# Altium footprint library Components.PcbLib: 82 footprints (part 1 of 6)
Each footprint in its own frame and in the unit in brackets; x right, y up, seen from the top. Pads: shape width x height; smd on the part's side, far side on the other; paste and mask are expansions set on the pad; w line width, h text height; cw(c..) or ccw(c..) is an arc to the next point about the centre after c.
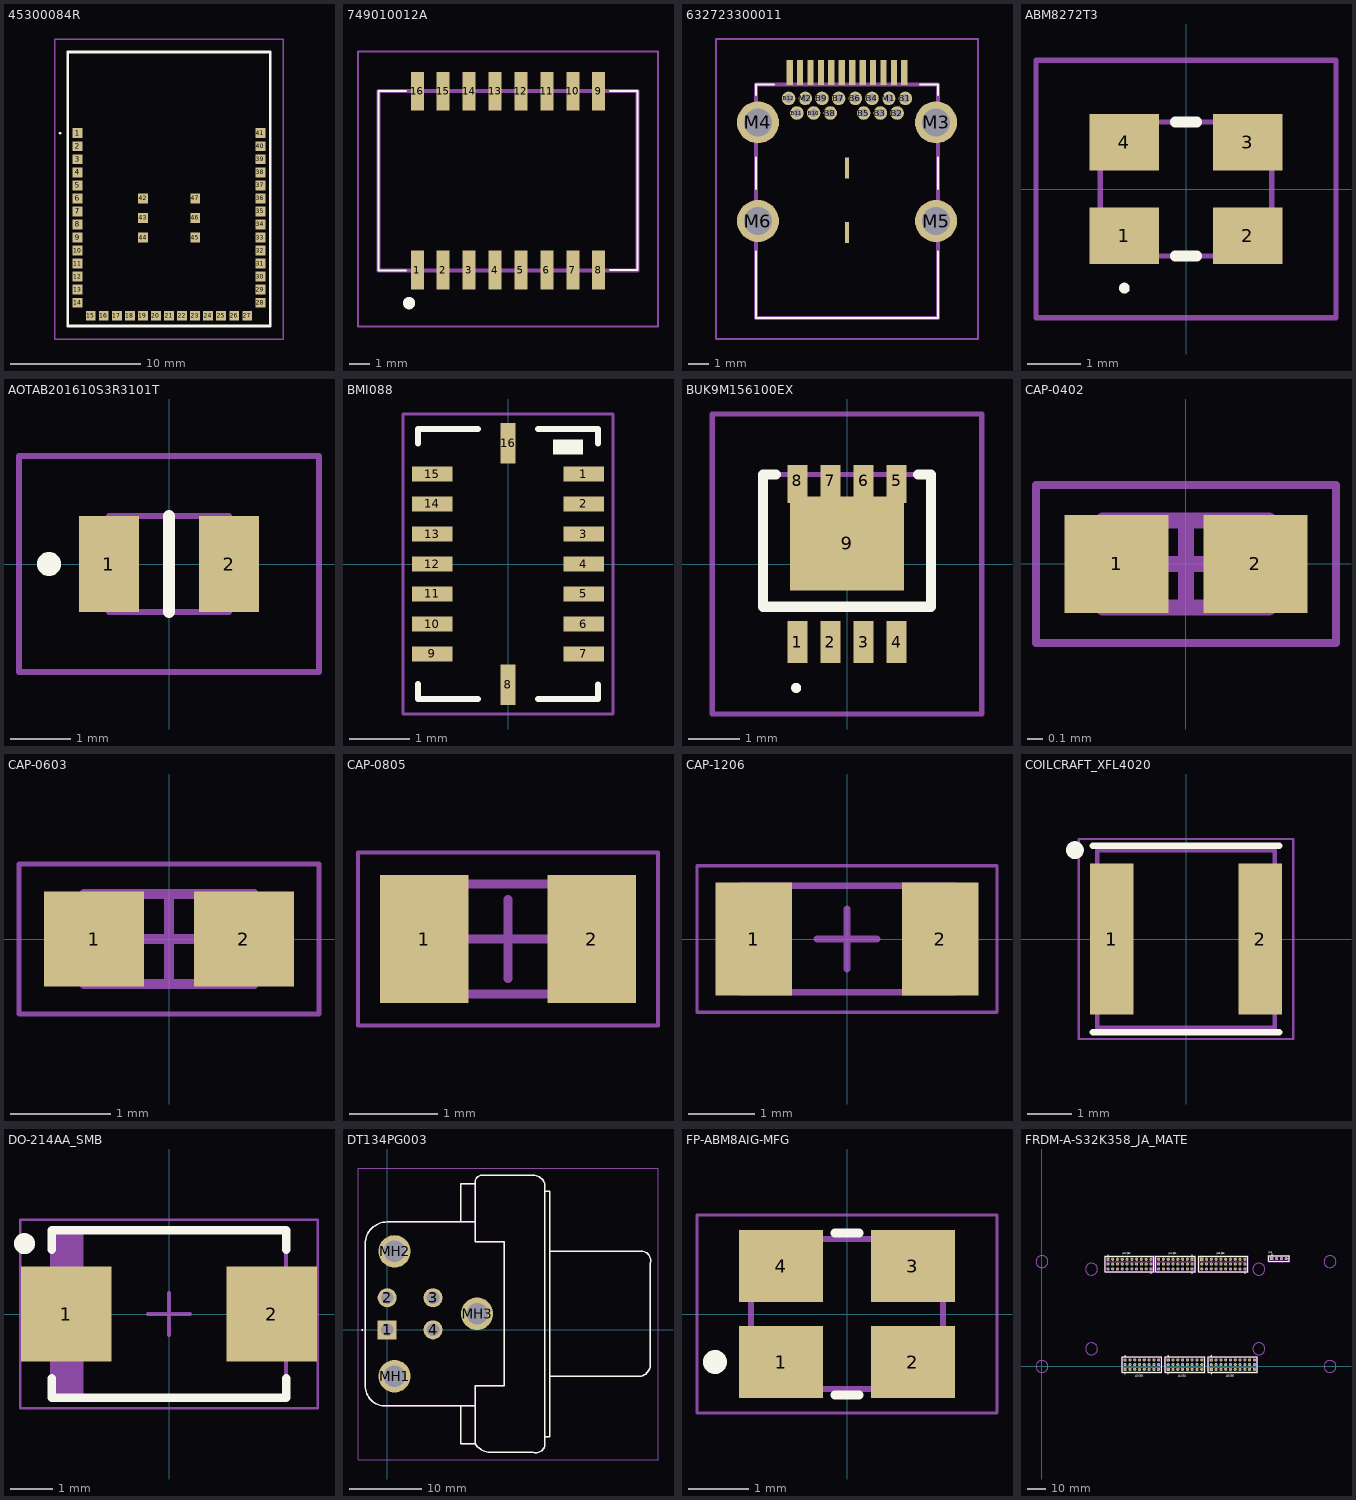
[diagram p0: the footprints below, top view; thin cyan lines are the x and y axes]

## 45300084R [mm]
pads (47):
  rect 0.76x0.76 smd: 1(2533,2544.28) 2(2533,2543.28) 3(2533,2542.28) 4(2533,2541.28) 5(2533,2540.28) 6(2533,2539.28) 7(2533,2538.28) 8(2533,2537.28) 9(2533,2536.28) 10(2533,2535.28) 11(2533,2534.28) 12(2533,2533.28) 13(2533,2532.28) 14(2533,2531.28) 15(2534,2530.28) 16(2535,2530.28) 17(2536,2530.28) 18(2537,2530.28) 19(2538,2530.28) 20(2539,2530.28) 21(2540,2530.28) 22(2541,2530.28) 23(2542,2530.28) 24(2543,2530.28) 25(2544,2530.28) 26(2545,2530.28) 27(2546,2530.28) 28(2547,2531.28) 29(2547,2532.28) 30(2547,2533.28) 31(2547,2534.28) 32(2547,2535.28) 33(2547,2536.28) 34(2547,2537.28) 35(2547,2538.28) 36(2547,2539.28) 37(2547,2540.28) 38(2547,2541.28) 39(2547,2542.28) 40(2547,2543.28) 41(2547,2544.28) 42(2538.01,2539.28) 43(2538.01,2537.78) 44(2538.01,2536.28) 45(2542.01,2536.28) 46(2542.01,2537.78) 47(2542.01,2539.28)
Top Overlay:
  lines w0.1: 2531.6,2544.28 ccw(c2531.65,2544.28) 2531.7,2544.28 ; 2531.6,2544.28 cw(c2531.65,2544.28) 2531.7,2544.28 ; 2531.6,2544.28 ccw(c2531.65,2544.28) 2531.7,2544.28
  lines w0.2: 2532.25,2529.5 2532.25,2550.5 2547.75,2550.5 2547.75,2529.5 2532.25,2529.5
Mechanical 13:
  lines w0.1: 2532.25,2529.5 2532.25,2550.5 2547.75,2550.5 2547.75,2529.5 2532.25,2529.5
Mechanical 15:
  lines w0.1: 2531.25,2528.5 2531.25,2551.5 2548.75,2551.5 2548.75,2528.5 2531.25,2528.5
3D body "453-00084R.stp": height 2.55, standoff 0, extent 2532.25,2529.5 2547.75,2550.5

## 749010012A [mm]
pads (16):
  rect 0.64x1.91 smd: 1(1265.555,1265.615) 2(1266.825,1265.615) 3(1268.095,1265.615) 4(1269.365,1265.615) 5(1270.635,1265.615) 6(1271.905,1265.615) 7(1273.175,1265.615) 8(1274.445,1265.615) 9(1274.445,1274.385) 10(1273.175,1274.385) 11(1271.905,1274.385) 12(1270.635,1274.385) 13(1269.365,1274.385) 14(1268.095,1274.385) 15(1266.825,1274.385) 16(1265.555,1274.385)
Top Overlay:
  lines w0.1: 1265,1265.6 1263.65,1265.6 1263.65,1274.385 1265,1274.4 ; 1275,1265.615 1276.35,1265.615 1276.35,1274.385 1275,1274.4
  lines w0.3: 1265,1264 cw(c1265.15,1264) 1265.3,1264 cw(c1265.15,1264) 1265,1264
Mechanical 13:
  lines w0.2: 1263.65,1265.6 1263.65,1274.4 1276.35,1274.4 1276.35,1265.6 1263.65,1265.6
Mechanical 15:
  lines w0.1: 1262.65,1262.85 1262.65,1276.34 1277.35,1276.34 1277.35,1262.85 1262.65,1262.85
3D body "749010012A.stp": height 5.4, standoff 0, extent 1263.9,1265.24 1276.1,1274.76

## 632723300011 [mm]
pads (32):
  rect 0.3x1.2 smd: A1(1267.25,1275.895) A2(1267.75,1275.895) A3(1268.25,1275.895) A4(1268.75,1275.895) A5(1269.25,1275.895) A6(1269.75,1275.895) A7(1270.25,1275.895) A8(1270.75,1275.895) A9(1271.25,1275.895) A10(1271.75,1275.895) A11(1272.25,1275.895) A12(1272.75,1275.895)
  round 0.65 hole 0.4: B1(1272.8,1274.645) B2(1272.4,1273.945) B3(1271.6,1273.945) B4(1271.2,1274.645) B5(1270.8,1273.945) B6(1270.4,1274.645) B7(1269.6,1274.645) B8(1269.2,1273.945) B9(1268.8,1274.645) B10(1268.4,1273.945) B11(1267.6,1273.945) B12(1267.2,1274.645) M1(1272,1274.645) M2(1268,1274.645)
  round 2.012 hole 1.342: M3(1274.27,1273.495) M4(1265.73,1273.495) M5(1274.27,1268.765) M6(1265.73,1268.765)
  rect 0.2x1 smd: M7(1270,1271.315) M8(1270,1268.215)
Top Overlay:
  lines w0.1: 1265.63,1267.305 1265.63,1264.105 1274.37,1264.105 1274.37,1267.305 ; 1265.63,1270.305 1265.63,1271.805 ; 1265.63,1274.805 1265.63,1275.305 1266.5,1275.305 ; 1273.5,1275.305 1274.37,1275.305 1274.37,1274.805 ; 1274.37,1270.305 1274.37,1271.805
Mechanical 13:
  lines w0.2: 1265.63,1264.105 1274.37,1264.105 1274.37,1275.305 1265.63,1275.305 1265.63,1264.105
Mechanical 15:
  lines w0.1: 1263.724,1263.105 1276.276,1263.105 1276.276,1277.495 1263.724,1277.495 1263.724,1263.105
3D body "632723300011.stp": height 3, standoff -1.86, extent 1265.63,1264.413 1274.37,1276.207

## ABM8272T3 [mm]
pads (4):
  rect 1.3x1.05 smd: 1(-1.15,-0.875) 2(1.15,-0.875) 3(1.15,0.875) 4(-1.15,0.875)
Top Overlay:
  lines w0.1: -1.15,-1.9 cw(c-1.15,-1.85) -1.15,-1.8 cw(c-1.15,-1.85) -1.15,-1.9
  lines w0.2: -0.2,-1.25 0.2,-1.25 ; -0.2,1.25 0.2,1.25
Mechanical 13:
  lines w0.1: -1.6,-1.25 -1.6,1.25 1.6,1.25 1.6,-1.25 -1.6,-1.25
Mechanical 15:
  lines w0.1: -2.8,-2.4 -2.8,2.4 2.8,2.4 2.8,-2.4 -2.8,-2.4
3D body "ABM8-272-T3.stp": height 0.75, standoff 0, extent -1.6,-1.25 1.6,1.25

## AOTAB201610S3R3101T [mm]
pads (2):
  rect 1x1.6 smd: 1(-1,0) 2(1,0)
Top Overlay:
  lines w0.2: 0,-0.8 0,0.8 ; -2,-0.1 ccw(c-2,0) -2,0.1 ccw(c-2,0) -2,-0.1
Mechanical 13:
  lines w0.1: -1,-0.8 -1,0.8 1,0.8 1,-0.8 -1,-0.8
Mechanical 15:
  lines w0.1: -2.5,-1.8 -2.5,1.8 2.5,1.8 2.5,-1.8 -2.5,-1.8
3D body "AOTA-B201610S3R3-101-T.stp": height 1, standoff 0, extent -1,-0.8 1,0.8

## BMI088 [mm]
pads (16):
  rect 0.675x0.25 smd: 1(1.266,1.5) 2(1.266,1) 3(1.266,0.5) 4(1.266,0) 5(1.266,-0.5) 6(1.266,-1) 7(1.266,-1.5) 9(-1.266,-1.5) 10(-1.266,-1) 11(-1.266,-0.5) 12(-1.266,0) 13(-1.266,0.5) 14(-1.266,1) 15(-1.266,1.5)
  rect 0.25x0.675 smd: 8(0,-2.012) 16(0,2.012)
Top Overlay:
  rectangle: 0.75,1.825 1.25,2.075
  lines w0.1: -1.5,-2 -1.5,-2.25 -0.5,-2.25 ; -1.5,2.012 -1.5,2.25 -0.5,2.25 ; 0.5,-2.25 1.5,-2.25 1.5,-2.012 ; 1.262,2.25 0.5,2.25 1.5,2.25 1.5,2.012
Mechanical 15:
  lines w0.05: -1.75,-2.5 1.75,-2.5 1.75,2.5 -1.75,2.5 -1.75,-2.5
3D body: height 1, standoff 0, extent -1.5,-2.25 1.5,2.25

## BUK9M156100EX [mm]
pads (11):
  rect 0.4x0.83 smd: 1(-0.975,-1.534) 2(-0.325,-1.534) 3(0.325,-1.534) 4(0.975,-1.534)
  rect 0.4x0.62 smd: 5(0.975,1.64) 6(0.325,1.64) 7(-0.325,1.64) 8(-0.975,1.64)
  rect 2.25x1.85 smd: 9(0,0.405)
  rect 0.05x0.13 smd: 10(1.15,1.265) 11(-1.15,1.265)
Top Overlay:
  lines w0.1: -1,-2.488 cw(c-1,-2.438) -1,-2.388 cw(c-1,-2.438) -1,-2.488
  lines w0.2: -1.4,1.759 -1.65,1.759 -1.65,-0.841 1.65,-0.841 1.65,1.759 1.4,1.759
Mechanical 13:
  lines w0.1: -1.65,-0.841 -1.65,1.759 1.65,1.759 1.65,-0.841 -1.65,-0.841
Mechanical 15:
  lines w0.1: -2.65,-2.95 -2.65,2.95 2.65,2.95 2.65,-2.95 -2.65,-2.95
3D body "BUK9M43-100EX.stp": height 0.85, standoff 0, extent -1.647,-1.652 1.653,1.648

## CAP-0402 [mm] "Chip Capacitor, 2-Leads, Body 1.00x0.50mm, IPC Medium Density"
height 0.55
pads (2):
  rect 0.66x0.62 smd: 1(-0.44,0) 2(0.44,0)
Mechanical 13:
  lines w0.1: -0.525,-0.275 0.525,-0.275 0.525,0.275 -0.525,0.275 -0.525,-0.275
Mechanical 15:
  lines w0.05: -0.95,-0.5 0.95,-0.5 0.95,0.5 -0.95,0.5 -0.95,-0.5
  lines w0.1: -0.275,0 0.275,0 ; 0,-0.275 0,0.275
3D body "CAPC1005X06N.step": height 0.55, standoff 0, extent -0.525,-0.275 0.525,0.275

## CAP-0603 [mm] "Chip Capacitor, 2-Leads, Body 1.60x0.80mm, IPC Medium Density"
height 0.9
pads (2):
  rect 1x0.95 smd: 1(-0.75,0) 2(0.75,0)
Mechanical 13:
  lines w0.1: -0.85,-0.45 -0.85,0.45 0.85,0.45 0.85,-0.45 -0.85,-0.45
Mechanical 15:
  lines w0.05: -1.5,-0.75 -1.5,0.75 1.5,0.75 1.5,-0.75 -1.5,-0.75
  lines w0.1: -0.45,0 0.45,0 ; 0,-0.45 0,0.45
3D body "CAPC1608X09N.step": height 0.9, standoff 0, extent -0.85,-0.45 0.85,0.45

## CAP-0805 [mm] "Chip Capacitor, 2-Leads, Body 2.00x1.25mm, IPC nominal land (1.00x1.45 pads, 1.90 pitch)"
pads (2):
  rect 1x1.45 smd: 1(1269.05,1270) 2(1270.95,1270)
Mechanical 13:
  lines w0.1: 1269,1269.375 1269,1270.625 1271,1270.625 1271,1269.375 1269,1269.375
Mechanical 15:
  lines w0.05: 1268.3,1269.02 1268.3,1270.98 1271.7,1270.98 1271.7,1269.02 1268.3,1269.02
  lines w0.1: 1269.55,1270 1270.45,1270 ; 1270,1269.55 1270,1270.45

## CAP-1206 [mm] "Chip Capacitor, 2-Leads, Body 3.20x1.60mm, land matches Passives RES-1206 (1.15x1.70 pads, 2.80 pitch)"
pads (2):
  rect 1.15x1.7 smd: 1(-1.4,0) 2(1.4,0)
Mechanical 13:
  lines w0.1: -1.6,-0.8 1.6,-0.8 1.6,0.8 -1.6,0.8 -1.6,-0.8
Mechanical 15:
  lines w0.05: -2.25,-1.1 2.25,-1.1 2.25,1.1 -2.25,1.1 -2.25,-1.1
  lines w0.1: -0.45,0 0.45,0 ; 0,-0.45 0,0.45

## COILCRAFT_XFL4020 [mm] "Coilcraft XFL4020 4x4 mm, recommended land pattern; 1 = start (short) lead"
pads (2):
  rect 0.98x3.4 smd: 1(-1.675,0) 2(1.675,0)
Top Overlay:
  circle w0.2: c-2.5,2 r0.1
  lines w0.15: -2.1,-2.1 2.1,-2.1 ; -2.1,2.1 2.1,2.1
Mechanical 13:
  lines w0.1: -2,-2 2,-2 2,2 -2,2 -2,-2
Mechanical 15:
  lines w0.05: -2.415,-2.25 2.415,-2.25 2.415,2.25 -2.415,2.25 -2.415,-2.25

## DO-214AA_SMB [mm] "DO-214AA (SMB) J-bend, Littelfuse SMBJ land pattern, body 5.40x3.62mm"
height 2.61
pads (2):
  rect 2.16x2.26 smd: 1(-2.45,0) 2(2.45,0)
Top Overlay:
  circle w0.25: c-3.45,1.68 r0.125
  lines w0.2: -2.8,-1.53 -2.8,-2 2.8,-2 2.8,-1.53 ; -2.8,1.53 -2.8,2 2.8,2 2.8,1.53
Mechanical 13:
  rectangle: -2.795,-1.97 -2.043,1.97
  lines w0.1: -2.795,-1.97 -2.795,1.97 2.795,1.97 2.795,-1.97 -2.795,-1.97
Mechanical 15:
  lines w0.05: -3.55,-2.25 -3.55,2.25 3.55,2.25 3.55,-2.25 -3.55,-2.25
  lines w0.1: -0.5,0 0.5,0 ; 0,-0.5 0,0.5
3D body "DO-214AA_SMB_NEW.step": height 2.61, standoff 0, extent -3.015,-1.97 3.015,1.97

## DT134PG003 [mm]
pads (7):
  rect 2.643x2.643 hole 1.762: 1(0,0)
  round 2.643 hole 1.762: 2(0,4.45) 3(6.35,4.45) 4(6.35,0)
  round 4.485 hole 2.99: MH1(1.02,-6.425) MH2(1.02,10.875) MH3(12.45,2.225)
Top Overlay:
  lines w0.1: -3.5,0 ccw(c-3.45,0) -3.4,0 ccw(c-3.45,0) -3.5,0
  lines w0.2: -3.04,4.225 -3.04,12.225 ; -3.04,4.45 -3.04,-7.775 ccw(c-0.28,-7.775) -0.773,-10.491 ; -3.039,12.227 cw(c0.001,11.88) 0.001,14.94 12.225,14.94 ; -0.775,-10.49 10.225,-10.49 ; 10.225,14.94 10.225,20.225 12.225,20.225 ; 12.224,-15.774 ccw(c14.225,-14.66) 14.225,-16.95 ; 12.225,-10.49 10.225,-10.49 ; 12.225,17.225 12.225,20.225 ; 12.225,18.225 12.225,12.225 16.225,12.225 16.225,-7.775 12.225,-7.775 12.225,-15.775 10.225,-15.775 10.225,-10.49 ; 14.225,-16.95 17.225,-16.95 20.225,-16.95 ; 20.224,-16.949 ccw(c20.612,-15.775) 21.849,-15.775 ; 21.849,20.226 ccw(c20.225,19.689) 20.225,21.4 15.225,21.4 13.125,21.4 ccw(c13.125,20.468) 12.225,20.225 ; 21.85,-15.775 21.85,20.225 ; 21.85,-14.775 22.525,-14.775 22.525,19.225 21.85,19.225 ; 22.525,-6.425 35.225,-6.425 ; 22.525,10.875 35.225,10.875 cw(c35.225,9.588) 36.46,9.225 ; 35.227,-6.425 ccw(c34.741,-4.775) 36.461,-4.775 36.46,9.225
Mechanical 13:
  lines w0.1: -3.04,10.875 -3.04,12.225 -3.04,-7.775 ccw(c-0.308,-7.775) 0.001,-10.489 ; -3.039,12.227 cw(c0.001,11.88) 0.001,14.94 12.225,14.94 12.225,12.225 16.225,12.225 16.225,-7.775 12.225,-7.775 12.225,-10.49 ; 0,-10.49 12.225,-10.49 ; 10.225,-10.49 10.225,-15.775 12.225,-15.775 12.225,-10.49 ; 10.225,14.94 10.225,20.225 12.225,20.225 ; 12.224,-15.774 ccw(c14.225,-14.66) 14.225,-16.95 ; 12.225,14.225 12.225,20.225 ; 14.225,-16.95 20.225,-16.95 ; 20.224,-16.949 ccw(c20.612,-15.775) 21.849,-15.775 ; 21.725,-14.775 22.525,-14.775 22.525,19.225 21.725,19.225 ; 21.849,20.226 ccw(c20.225,19.689) 20.225,21.4 13.125,21.4 ccw(c13.125,20.468) 12.225,20.225 ; 21.85,-15.775 21.85,20.225 ; 22.525,-6.425 35.225,-6.425 ; 22.525,10.875 35.225,10.875 cw(c35.225,9.588) 36.46,9.225 ; 35.227,-6.425 ccw(c34.741,-4.775) 36.461,-4.775 36.46,9.225
Mechanical 15:
  lines w0.1: -4.04,-18.012 37.512,-18.012 37.512,22.4 -4.04,22.4 -4.04,-18.012
3D body "DT13-4P-G003.stp": height 33.89, standoff -4.69, extent -3.237,-18.044 36.26,20.31

## FP-ABM8AIG-MFG [mm] "Abracon ABM8AIG 3.2x2.5 mm 4-pad crystal, Abracon recommended land pattern (1.4x1.2 pads, 2.2 x 1.6 centers); 1,3 = crystal, 2,4 = GND/lid"
pads (4):
  rect 1.4x1.2 smd: 1(-1.1,-0.8) 2(1.1,-0.8) 3(1.1,0.8) 4(-1.1,0.8)
Top Overlay:
  circle w0.2: c-2.2,-0.8 r0.1
  lines w0.15: -0.2,-1.35 0.2,-1.35 ; -0.2,1.35 0.2,1.35
Mechanical 13:
  lines w0.1: -1.6,-1.25 1.6,-1.25 1.6,1.25 -1.6,1.25 -1.6,-1.25
Mechanical 15:
  lines w0.05: -2.5,-1.65 2.5,-1.65 2.5,1.65 -2.5,1.65 -2.5,-1.65

## FRDM-A-S32K358_JA_MATE [mil] "Mates FRDM-A-S32K358 Rev A JA1-JA6 (2x8/2x10 shrouded skt), JB1-JB6 (1x8/1x10, DNP on FRDM), J15 (1x4 CAN skt), 100 mil; 8x 118 mil NPTH; origin = board datum hole; from NXP IPC-D-356"
pads (166):
  rect 66x66 hole 40: J15-1(4800.3,2254.2) JA1-1(3136.5,2038.5) JA2-1(2276.5,2038.5) JA3-1(1736.5,138.5) JA4-1(2636.5,138.5) JA5-1(3536.5,138.5) JA6-1(4236.5,2038.5) JB1-1(3136.5,2238.5) JB2-1(1376.5,2238.5) JB3-1(1736.5,-61.5) JB4-1(2636.5,-61.5) JB5-1(3536.5,-61.5) JB6-1(3336.5,2238.5)
  round 66 hole 40: J15-2(4900.3,2254.2) J15-3(5000.3,2254.2) J15-4(5100.3,2254.2) JA1-2(3136.5,2138.5) JA1-3(3036.5,2038.5) JA1-4(3036.5,2138.5) JA1-5(2936.5,2038.5) JA1-6(2936.5,2138.5) JA1-7(2836.5,2038.5) JA1-8(2836.5,2138.5) JA1-9(2736.5,2038.5) JA1-10(2736.5,2138.5) JA1-11(2636.5,2038.5) JA1-12(2636.5,2138.5) JA1-13(2536.5,2038.5) JA1-14(2536.5,2138.5) JA1-15(2436.5,2038.5) JA1-16(2436.5,2138.5) JA2-2(2276.5,2138.5) JA2-3(2176.5,2038.5) JA2-4(2176.5,2138.5) JA2-5(2076.5,2038.5) JA2-6(2076.5,2138.5) JA2-7(1976.5,2038.5) JA2-8(1976.5,2138.5) JA2-9(1876.5,2038.5) JA2-10(1876.5,2138.5) JA2-11(1776.5,2038.5) JA2-12(1776.5,2138.5) JA2-13(1676.5,2038.5) JA2-14(1676.5,2138.5) JA2-15(1576.5,2038.5) JA2-16(1576.5,2138.5) JA2-17(1476.5,2038.5) JA2-18(1476.5,2138.5) JA2-19(1376.5,2038.5) JA2-20(1376.5,2138.5) JA3-2(1736.5,38.5) JA3-3(1836.5,138.5) JA3-4(1836.5,38.5) JA3-5(1936.5,138.5) JA3-6(1936.5,38.5) JA3-7(2036.5,138.5) JA3-8(2036.5,38.5) JA3-9(2136.5,138.5) JA3-10(2136.5,38.5) JA3-11(2236.5,138.5) JA3-12(2236.5,38.5) JA3-13(2336.5,138.5) JA3-14(2336.5,38.5) JA3-15(2436.5,138.5) JA3-16(2436.5,38.5) JA4-2(2636.5,38.5) JA4-3(2736.5,138.5) JA4-4(2736.5,38.5) JA4-5(2836.5,138.5) JA4-6(2836.5,38.5) JA4-7(2936.5,138.5) JA4-8(2936.5,38.5) JA4-9(3036.5,138.5) JA4-10(3036.5,38.5) JA4-11(3136.5,138.5) JA4-12(3136.5,38.5) JA4-13(3236.5,138.5) JA4-14(3236.5,38.5) JA4-15(3336.5,138.5) JA4-16(3336.5,38.5) JA5-2(3536.5,38.5) JA5-3(3636.5,138.5) JA5-4(3636.5,38.5) JA5-5(3736.5,138.5) JA5-6(3736.5,38.5) JA5-7(3836.5,138.5) JA5-8(3836.5,38.5) JA5-9(3936.5,138.5) JA5-10(3936.5,38.5) JA5-11(4036.5,138.5) JA5-12(4036.5,38.5) JA5-13(4136.5,138.5) JA5-14(4136.5,38.5) JA5-15(4236.5,138.5) JA5-16(4236.5,38.5) JA5-17(4336.5,138.5) JA5-18(4336.5,38.5) JA5-19(4436.5,138.5) JA5-20(4436.5,38.5) JA6-2(4236.5,2138.5) JA6-3(4136.5,2038.5) JA6-4(4136.5,2138.5) JA6-5(4036.5,2038.5) JA6-6(4036.5,2138.5) JA6-7(3936.5,2038.5) JA6-8(3936.5,2138.5) JA6-9(3836.5,2038.5) JA6-10(3836.5,2138.5) JA6-11(3736.5,2038.5) JA6-12(3736.5,2138.5) JA6-13(3636.5,2038.5) JA6-14(3636.5,2138.5) JA6-15(3536.5,2038.5) JA6-16(3536.5,2138.5) JA6-17(3436.5,2038.5) JA6-18(3436.5,2138.5) JA6-19(3336.5,2038.5) JA6-20(3336.5,2138.5) JB1-2(3036.5,2238.5) JB1-3(2936.5,2238.5) JB1-4(2836.5,2238.5) JB1-5(2736.5,2238.5) JB1-6(2636.5,2238.5) JB1-7(2536.5,2238.5) JB1-8(2436.5,2238.5) JB2-2(1476.5,2238.5) JB2-3(1576.5,2238.5) JB2-4(1676.5,2238.5) JB2-5(1776.5,2238.5) JB2-6(1876.5,2238.5) JB2-7(1976.5,2238.5) JB2-8(2076.5,2238.5) JB2-9(2176.5,2238.5) JB2-10(2276.5,2238.5) JB3-2(1836.5,-61.5) JB3-3(1936.5,-61.5) JB3-4(2036.5,-61.5) JB3-5(2136.5,-61.5) JB3-6(2236.5,-61.5) JB3-7(2336.5,-61.5) JB3-8(2436.5,-61.5) JB4-2(2736.5,-61.5) JB4-3(2836.5,-61.5) JB4-4(2936.5,-61.5) JB4-5(3036.5,-61.5) JB4-6(3136.5,-61.5) JB4-7(3236.5,-61.5) JB4-8(3336.5,-61.5) JB5-2(3636.5,-61.5) JB5-3(3736.5,-61.5) JB5-4(3836.5,-61.5) JB5-5(3936.5,-61.5) JB5-6(4036.5,-61.5) JB5-7(4136.5,-61.5) JB5-8(4236.5,-61.5) JB5-9(4336.5,-61.5) JB5-10(4436.5,-61.5) JB6-2(3436.5,2238.5) JB6-3(3536.5,2238.5) JB6-4(3636.5,2238.5) JB6-5(3736.5,2238.5) JB6-6(3836.5,2238.5) JB6-7(3936.5,2238.5) JB6-8(4036.5,2238.5) JB6-9(4136.5,2238.5) JB6-10(4236.5,2238.5)
Top Overlay:
  circle w10: c3136.5,1953.5 r5
  circle w10: c2276.5,1953.5 r5
  circle w10: c1736.5,223.5 r5
  circle w10: c2636.5,223.5 r5
  circle w10: c3536.5,223.5 r5
  circle w10: c4236.5,1953.5 r5
  circle w10: c4800.3,2339.2 r5
  circle w10: c3136.5,2323.5 r5
  circle w10: c1376.5,2323.5 r5
  circle w10: c1736.5,-146.5 r5
  circle w10: c2636.5,-146.5 r5
  circle w10: c3536.5,-146.5 r5
  circle w10: c3336.5,2323.5 r5
  lines w6: 1316.5,1978.5 2336.5,1978.5 2336.5,2298.5 1316.5,2298.5 1316.5,1978.5 ; 1676.5,-121.5 2496.5,-121.5 2496.5,198.5 1676.5,198.5 1676.5,-121.5 ; 2376.5,1978.5 3196.5,1978.5 3196.5,2298.5 2376.5,2298.5 2376.5,1978.5 ; 2576.5,-121.5 3396.5,-121.5 3396.5,198.5 2576.5,198.5 2576.5,-121.5 ; 3276.5,1978.5 4296.5,1978.5 4296.5,2298.5 3276.5,2298.5 3276.5,1978.5 ; 3476.5,-121.5 4496.5,-121.5 4496.5,198.5 3476.5,198.5 3476.5,-121.5 ; 4740.3,2194.2 5160.3,2194.2 5160.3,2314.2 4740.3,2314.2 4740.3,2194.2
  text "JA1/JB1" at 2646.5,2348.5 h40
  text "JA2/JB2" at 1686.5,2348.5 h40
  text "JA3/JB3" at 1946.5,-211.5 h40
  text "JA4/JB4" at 2846.5,-211.5 h40
  text "JA5/JB5" at 3846.5,-211.5 h40
  text "JA6/JB6" at 3646.5,2348.5 h40
  text "J15" at 4740.3,2364.2 h40
Mechanical 13:
  circle w4: c0,0 r125
  circle w4: c0,2190 r125
  circle w4: c1035,2032 r125
  circle w4: c1035,370 r125
  circle w4: c4530,370 r125
  circle w4: c4530,2032 r125
  circle w4: c6015.59,0 r125
  circle w4: c6015.59,2190 r125
  lines w4: 1326.5,2188.5 2326.5,2188.5 ; 1326.5,2188.5 1326.5,1988.5 2326.5,1988.5 2326.5,2188.5 ; 1326.5,2188.5 2326.5,2188.5 ; 1326.5,2188.5 1326.5,2288.5 2326.5,2288.5 2326.5,2188.5 ; 1686.5,-11.5 2486.5,-11.5 ; 1686.5,-11.5 1686.5,188.5 2486.5,188.5 2486.5,-11.5 ; 1686.5,-11.5 2486.5,-11.5 ; 1686.5,-11.5 1686.5,-111.5 2486.5,-111.5 2486.5,-11.5 ; 2386.5,2188.5 3186.5,2188.5 ; 2386.5,2188.5 2386.5,1988.5 3186.5,1988.5 3186.5,2188.5 ; 2386.5,2188.5 3186.5,2188.5 ; 2386.5,2188.5 2386.5,2288.5 3186.5,2288.5 3186.5,2188.5 ; 2586.5,-11.5 3386.5,-11.5 ; 2586.5,-11.5 2586.5,188.5 3386.5,188.5 3386.5,-11.5 ; 2586.5,-11.5 3386.5,-11.5 ; 2586.5,-11.5 2586.5,-111.5 3386.5,-111.5 3386.5,-11.5 ; 3286.5,2188.5 4286.5,2188.5 ; 3286.5,2188.5 3286.5,1988.5 4286.5,1988.5 4286.5,2188.5 ; 3286.5,2188.5 4286.5,2188.5 ; 3286.5,2188.5 3286.5,2288.5 4286.5,2288.5 4286.5,2188.5 ; 3486.5,-11.5 4486.5,-11.5 ; 3486.5,-11.5 3486.5,188.5 4486.5,188.5 4486.5,-11.5 ; 3486.5,-11.5 4486.5,-11.5 ; 3486.5,-11.5 3486.5,-111.5 4486.5,-111.5 4486.5,-11.5 ; 4750.3,2204.2 5150.3,2204.2 5150.3,2304.2 4750.3,2304.2 4750.3,2204.2
Mechanical 15:
  lines w2: 1306.5,1968.5 2346.5,1968.5 2346.5,2308.5 1306.5,2308.5 1306.5,1968.5 ; 1666.5,-131.5 2506.5,-131.5 2506.5,208.5 1666.5,208.5 1666.5,-131.5 ; 2366.5,1968.5 3206.5,1968.5 3206.5,2308.5 2366.5,2308.5 2366.5,1968.5 ; 2566.5,-131.5 3406.5,-131.5 3406.5,208.5 2566.5,208.5 2566.5,-131.5 ; 3266.5,1968.5 4306.5,1968.5 4306.5,2308.5 3266.5,2308.5 3266.5,1968.5 ; 3466.5,-131.5 4506.5,-131.5 4506.5,208.5 3466.5,208.5 3466.5,-131.5 ; 4730.3,2184.2 5170.3,2184.2 5170.3,2324.2 4730.3,2324.2 4730.3,2184.2